# Altium footprint library ProjectFootprints.PcbLib: 37 footprints (part 2 of 3)
Each footprint in its own frame and in the unit in brackets; x right, y up, seen from the top. Pads: shape width x height; smd on the part's side, far side on the other; paste and mask are expansions set on the pad; w line width, h text height; cw(c..) or ccw(c..) is an arc to the next point about the centre after c.
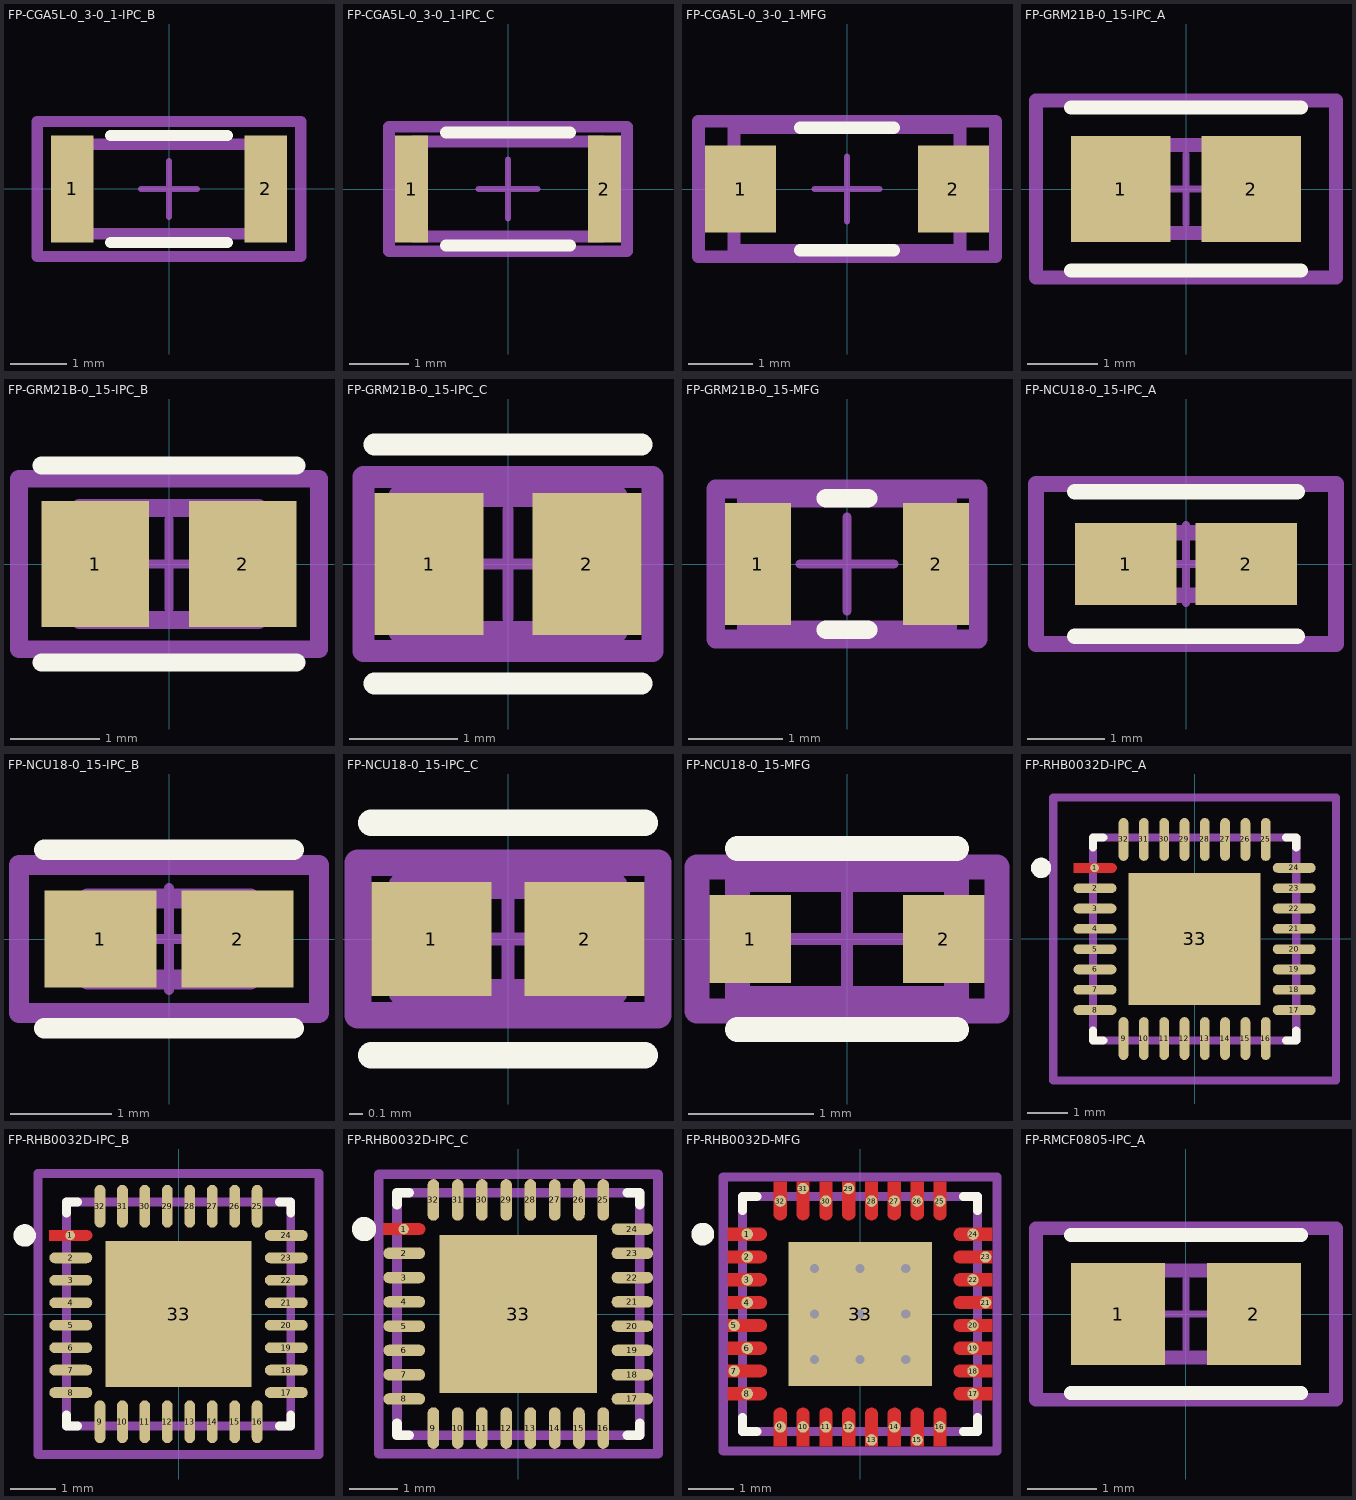
[diagram p1: the footprints below, top view; thin cyan lines are the x and y axes]

## FP-CGA5L-0_3-0_1-IPC_B [mm]
pads (2):
  rect 0.756x1.906 smd paste+0 mask+0: 1(-1.725,0) 2(1.725,0)
Top Overlay:
  lines w0.2: -1.047,-0.953 1.047,-0.953 ; -1.047,0.953 1.047,0.953
Top Assembly:
  lines w0.2: -2.353,-1.203 -2.353,1.203 2.353,1.203 2.353,-1.203 -2.353,-1.203
  text ".Designator" at 0,0.188 h1
Top 3D Body:
  lines w0.2: -1.6,-0.8 -1.6,0.8 1.6,0.8 1.6,-0.8 -1.6,-0.8
Top Courtyard:
  lines w0.2: -2.353,-1.203 -2.353,1.203 2.353,1.203 2.353,-1.203 -2.353,-1.203
Top Component Center:
  lines w0.1: -0.5,0 0.5,0 ; 0,-0.5 0,0.5
3D body "Cap_TDK_CGA5L2X7R2A154K160AA_eec.STEP": height 0.25, standoff 0, extent -2.353,-1.203 2.353,1.203

## FP-CGA5L-0_3-0_1-IPC_C [mm]
pads (2):
  rect 0.556x1.806 smd paste+0 mask+0: 1(-1.625,0) 2(1.625,0)
Top Overlay:
  lines w0.2: -1.047,-0.95 1.047,-0.95 ; -1.047,0.95 1.047,0.95
Top Assembly:
  lines w0.2: -2.003,-1.05 -2.003,1.05 2.003,1.05 2.003,-1.05 -2.003,-1.05
  text ".Designator" at 0,0.188 h1
Top 3D Body:
  lines w0.2: -1.6,-0.8 -1.6,0.8 1.6,0.8 1.6,-0.8 -1.6,-0.8
Top Courtyard:
  lines w0.2: -2.003,-1.05 -2.003,1.05 2.003,1.05 2.003,-1.05 -2.003,-1.05
Top Component Center:
  lines w0.1: -0.5,0 0.5,0 ; 0,-0.5 0,0.5
3D body "Cap_TDK_CGA5L2X7R2A154K160AA_eec.STEP": height 0.25, standoff 0, extent -2.003,-1.05 2.003,1.05

## FP-CGA5L-0_3-0_1-MFG [mm]
pads (2):
  rect 1.1x1.35 smd paste+0 mask+0: 1(-1.65,0) 2(1.65,0)
Top Overlay:
  lines w0.2: -0.725,-0.95 0.725,-0.95 ; -0.725,0.95 0.725,0.95
Top Assembly:
  lines w0.2: -2.3,-1.05 2.3,-1.05 2.3,1.05 -2.3,1.05 -2.3,-1.05
  text ".Designator" at 0,0.188 h1
Top 3D Body:
  lines w0.2: -1.75,-0.95 1.75,-0.95 1.75,0.95 -1.75,0.95 -1.75,-0.95
Top Courtyard:
  lines w0.2: -2.3,-1.05 2.3,-1.05 2.3,1.05 -2.3,1.05 -2.3,-1.05
Top Component Center:
  lines w0.1: -0.5,0 0.5,0 ; 0,-0.5 0,0.5
3D body "Cap_TDK_CGA5L2X7R2A154K160AA_eec.STEP": height 0.25, standoff 0, extent -2.3,-1.05 2.3,1.05

## FP-GRM21B-0_15-IPC_A [mm]
pads (2):
  rect 1.406x1.508 smd paste+0 mask+0: 1(-0.926,0) 2(0.926,0)
Top Overlay:
  lines w0.2: -1.629,-1.154 1.629,-1.154 ; -1.629,1.154 1.629,1.154
Top Assembly:
  lines w0.2: -2.129,-1.254 -2.129,1.254 2.129,1.254 2.129,-1.254 -2.129,-1.254
  text ".Designator" at 0,0.188 h1
Top 3D Body:
  lines w0.2: -1,-0.625 -1,0.625 1,0.625 1,-0.625 -1,-0.625
Top Courtyard:
  lines w0.2: -2.129,-1.254 -2.129,1.254 2.129,1.254 2.129,-1.254 -2.129,-1.254
Top Component Center:
  lines w0.1: -0.5,0 0.5,0 ; 0,-0.5 0,0.5
3D body "Cap_Murata_GRM21BC81C106KA73L_eec.STEP": height 0.25, standoff 0, extent -2.129,-1.254 2.129,1.254

## FP-GRM21B-0_15-IPC_B [mm]
pads (2):
  rect 1.206x1.408 smd paste+0 mask+0: 1(-0.826,0) 2(0.826,0)
Top Overlay:
  lines w0.2: -1.429,-1.104 1.429,-1.104 ; -1.429,1.104 1.429,1.104
Top Assembly:
  lines w0.2: -1.679,-0.954 -1.679,0.954 1.679,0.954 1.679,-0.954 -1.679,-0.954
  text ".Designator" at 0,0.188 h1
Top 3D Body:
  lines w0.2: -1,-0.625 -1,0.625 1,0.625 1,-0.625 -1,-0.625
Top Courtyard:
  lines w0.2: -1.679,-0.954 -1.679,0.954 1.679,0.954 1.679,-0.954 -1.679,-0.954
Top Component Center:
  lines w0.1: -0.5,0 0.5,0 ; 0,-0.5 0,0.5
3D body "Cap_Murata_GRM21BC81C106KA73L_eec.STEP": height 0.25, standoff 0, extent -1.679,-0.954 1.679,0.954

## FP-GRM21B-0_15-IPC_C [mm]
pads (2):
  rect 1.006x1.308 smd paste+0 mask+0: 1(-0.726,0) 2(0.726,0)
Top Overlay:
  lines w0.2: -1.229,-1.1 1.229,-1.1 ; -1.229,1.1 1.229,1.1
Top Assembly:
  lines w0.2: -1.329,-0.8 -1.329,0.8 1.329,0.8 1.329,-0.8 -1.329,-0.8
  text ".Designator" at 0,0.188 h1
Top 3D Body:
  lines w0.2: -1,-0.625 -1,0.625 1,0.625 1,-0.625 -1,-0.625
Top Courtyard:
  lines w0.2: -1.329,-0.8 -1.329,0.8 1.329,0.8 1.329,-0.8 -1.329,-0.8
Top Component Center:
  lines w0.1: -0.5,0 0.5,0 ; 0,-0.5 0,0.5
3D body "Cap_Murata_GRM21BC81C106KA73L_eec.STEP": height 0.25, standoff 0, extent -1.329,-0.8 1.329,0.8

## FP-GRM21B-0_15-MFG [mm]
pads (2):
  rect 0.7x1.3 smd paste+0 mask+0: 1(-0.95,0) 2(0.95,0)
Top Overlay:
  lines w0.2: -0.225,-0.7 0.225,-0.7 ; -0.225,0.7 0.225,0.7
Top Assembly:
  lines w0.2: -1.4,-0.8 1.4,-0.8 1.4,0.8 -1.4,0.8 -1.4,-0.8
  text ".Designator" at 0,0.188 h1
Top 3D Body:
  lines w0.2: -1.075,-0.7 1.075,-0.7 1.075,0.7 -1.075,0.7 -1.075,-0.7
Top Courtyard:
  lines w0.2: -1.4,-0.8 1.4,-0.8 1.4,0.8 -1.4,0.8 -1.4,-0.8
Top Component Center:
  lines w0.1: -0.5,0 0.5,0 ; 0,-0.5 0,0.5
3D body "Cap_Murata_GRM21BC81C106KA73L_eec.STEP": height 0.25, standoff 0, extent -1.4,-0.8 1.4,0.8

## FP-NCU18-0_15-IPC_A [mm]
pads (2):
  rect 1.306x1.058 smd paste+0 mask+0: 1(-0.776,0) 2(0.776,0)
Top Overlay:
  lines w0.2: -1.429,-0.929 1.429,-0.929 ; -1.429,0.929 1.429,0.929
Top Assembly:
  lines w0.2: -1.929,-1.029 -1.929,1.029 1.929,1.029 1.929,-1.029 -1.929,-1.029
  text ".Designator" at 0,0.188 h1
Top 3D Body:
  lines w0.2: -0.8,-0.4 -0.8,0.4 0.8,0.4 0.8,-0.4 -0.8,-0.4
Top Courtyard:
  lines w0.2: -1.929,-1.029 -1.929,1.029 1.929,1.029 1.929,-1.029 -1.929,-1.029
Top Component Center:
  lines w0.1: -0.5,0 0.5,0 ; 0,-0.5 0,0.5
3D body "Res_Murata_NCU18WB473J6SRB_eec.STEP": height 0.25, standoff 0, extent -1.929,-1.029 1.929,1.029

## FP-NCU18-0_15-IPC_B [mm]
pads (2):
  rect 1.106x0.958 smd paste+0 mask+0: 1(-0.676,0) 2(0.676,0)
Top Overlay:
  lines w0.2: -1.229,-0.879 1.229,-0.879 ; -1.229,0.879 1.229,0.879
Top Assembly:
  lines w0.2: -1.479,-0.729 1.479,-0.729 1.479,0.729 -1.479,0.729 -1.479,-0.729
  text ".Designator" at 0,0.188 h1
Top 3D Body:
  lines w0.2: -0.8,-0.4 0.8,-0.4 0.8,0.4 -0.8,0.4 -0.8,-0.4
Top Courtyard:
  lines w0.2: -1.479,-0.729 1.479,-0.729 1.479,0.729 -1.479,0.729 -1.479,-0.729
Top Component Center:
  lines w0.1: -0.5,0 0.5,0 ; 0,-0.5 0,0.5
3D body "Res_Murata_NCU18WB473J6SRB_eec.STEP": height 0.25, standoff 0, extent -1.479,-0.729 1.479,0.729

## FP-NCU18-0_15-IPC_C [mm]
pads (2):
  rect 0.906x0.858 smd paste+0 mask+0: 1(-0.576,0) 2(0.576,0)
Top Overlay:
  lines w0.2: -1.029,-0.875 1.029,-0.875 ; -1.029,0.875 1.029,0.875
Top Assembly:
  lines w0.2: -1.129,-0.575 1.129,-0.575 1.129,0.575 -1.129,0.575 -1.129,-0.575
  text ".Designator" at 0,0.188 h1
Top 3D Body:
  lines w0.2: -0.8,-0.4 0.8,-0.4 0.8,0.4 -0.8,0.4 -0.8,-0.4
Top Courtyard:
  lines w0.2: -1.129,-0.575 1.129,-0.575 1.129,0.575 -1.129,0.575 -1.129,-0.575
Top Component Center:
  lines w0.1: -0.5,0 0.5,0 ; 0,-0.5 0,0.5
3D body "Res_Murata_NCU18WB473J6SRB_eec.STEP": height 0.25, standoff 0, extent -1.129,-0.575 1.129,0.575

## FP-NCU18-0_15-MFG [mm]
pads (2):
  rect 0.65x0.7 smd paste+0 mask+0: 1(-0.775,0) 2(0.775,0)
Top Overlay:
  lines w0.2: -0.875,-0.725 0.875,-0.725 ; -0.875,0.725 0.875,0.725
Top Assembly:
  lines w0.2: -1.2,-0.575 1.2,-0.575 1.2,0.575 -1.2,0.575 -1.2,-0.575
  text ".Designator" at 0,0.188 h1
Top 3D Body:
  lines w0.2: -0.875,-0.475 0.875,-0.475 0.875,0.475 -0.875,0.475 -0.875,-0.475
Top Courtyard:
  lines w0.2: -1.2,-0.575 1.2,-0.575 1.2,0.575 -1.2,0.575 -1.2,-0.575
Top Component Center:
  lines w0.1: -0.5,0 0.5,0 ; 0,-0.5 0,0.5
3D body "Res_Murata_NCU18WB473J6SRB_eec.STEP": height 0.25, standoff 0, extent -1.2,-0.575 1.2,0.575

## FP-RHB0032D-IPC_A [mm]
pads (33):
  round 0.215 smd paste+0 mask+0: 1(-2.463,1.75)
  rrect100% 1.057x0.239 smd paste+0 mask+0: 2(-2.451,1.25) 3(-2.451,0.75) 4(-2.451,0.25) 5(-2.451,-0.25) 6(-2.451,-0.75) 7(-2.451,-1.25) 8(-2.451,-1.75) 17(2.451,-1.75) 18(2.451,-1.25) 19(2.451,-0.75) 20(2.451,-0.25) 21(2.451,0.25) 22(2.451,0.75) 23(2.451,1.25) 24(2.451,1.75)
  rrect100% 0.239x1.057 smd paste+0 mask+0: 9(-1.75,-2.451) 10(-1.25,-2.451) 11(-0.75,-2.451) 12(-0.25,-2.451) 13(0.25,-2.451) 14(0.75,-2.451) 15(1.25,-2.451) 16(1.75,-2.451) 25(1.75,2.451) 26(1.25,2.451) 27(0.75,2.451) 28(0.25,2.451) 29(-0.25,2.451) 30(-0.75,2.451) 31(-1.25,2.451) 32(-1.75,2.451)
  rect 3.25x3.25 smd paste-1000 mask+0: 33(0,0)
Top Layer:
  region: -2.979,1.87 -2.042,1.87 -2.018,1.87 -1.974,1.851 -1.94,1.818 -1.922,1.774 -1.922,1.75 -1.922,1.726 -1.94,1.682 -1.974,1.649 -2.018,1.63 -2.042,1.63 -2.979,1.63
Top Overlay:
  circle w0.25: c-3.779,1.75 r0.125
  lines w0.2: -2.5,-2.25 -2.5,-2.5 -2.25,-2.5 ; -2.5,2.25 -2.5,2.5 -2.25,2.5 ; 2.25,-2.5 2.5,-2.5 2.5,-2.25 ; 2.25,2.5 2.5,2.5 2.5,2.25
Top Paste:
  rectangle: -1.028,-1.028 1.028,1.028
Top Assembly:
  lines w0.2: -3.479,-3.479 -3.479,3.479 3.479,3.479 3.479,-3.479 -3.479,-3.479
  text ".Designator" at 0,0.188 h1
Top 3D Body:
  lines w0.2: -2.5,-2.5 -2.5,2.5 2.5,2.5 2.5,-2.5 -2.5,-2.5
Top Courtyard:
  lines w0.2: -3.479,-3.479 -3.479,3.479 3.479,3.479 3.479,-3.479 -3.479,-3.479
Top Component Center:
  lines w0.1: -0.5,0 0.5,0 ; 0,-0.5 0,0.5
3D body "IC_Texas_Instruments_ADS1204IRHBR_eec.STEP": height 0.25, standoff 0, extent -3.479,-3.479 3.479,3.479

## FP-RHB0032D-IPC_B [mm]
pads (33):
  round 0.215 smd paste+0 mask+0: 1(-2.413,1.75)
  rrect100% 0.957x0.239 smd paste+0 mask+0: 2(-2.401,1.25) 3(-2.401,0.75) 4(-2.401,0.25) 5(-2.401,-0.25) 6(-2.401,-0.75) 7(-2.401,-1.25) 8(-2.401,-1.75) 17(2.401,-1.75) 18(2.401,-1.25) 19(2.401,-0.75) 20(2.401,-0.25) 21(2.401,0.25) 22(2.401,0.75) 23(2.401,1.25) 24(2.401,1.75)
  rrect100% 0.239x0.957 smd paste+0 mask+0: 9(-1.75,-2.401) 10(-1.25,-2.401) 11(-0.75,-2.401) 12(-0.25,-2.401) 13(0.25,-2.401) 14(0.75,-2.401) 15(1.25,-2.401) 16(1.75,-2.401) 25(1.75,2.401) 26(1.25,2.401) 27(0.75,2.401) 28(0.25,2.401) 29(-0.25,2.401) 30(-0.75,2.401) 31(-1.25,2.401) 32(-1.75,2.401)
  rect 3.25x3.25 smd paste-1000 mask+0: 33(0,0)
Top Layer:
  region: -2.879,1.87 -2.042,1.87 -2.018,1.87 -1.974,1.851 -1.94,1.818 -1.922,1.774 -1.922,1.75 -1.922,1.726 -1.94,1.682 -1.974,1.649 -2.018,1.63 -2.042,1.63 -2.879,1.63
Top Overlay:
  circle w0.25: c-3.429,1.75 r0.125
  lines w0.2: -2.5,-2.25 -2.5,-2.5 -2.25,-2.5 ; -2.5,2.25 -2.5,2.5 -2.25,2.5 ; 2.25,-2.5 2.5,-2.5 2.5,-2.25 ; 2.25,2.5 2.5,2.5 2.5,2.25
Top Paste:
  rectangle: -1.028,-1.028 1.028,1.028
Top Assembly:
  lines w0.2: -3.129,-3.129 3.129,-3.129 3.129,3.129 -3.129,3.129 -3.129,-3.129
  text ".Designator" at 0,0.188 h1
Top 3D Body:
  lines w0.2: -2.5,-2.5 2.5,-2.5 2.5,2.5 -2.5,2.5 -2.5,-2.5
Top Courtyard:
  lines w0.2: -3.129,-3.129 3.129,-3.129 3.129,3.129 -3.129,3.129 -3.129,-3.129
Top Component Center:
  lines w0.1: -0.5,0 0.5,0 ; 0,-0.5 0,0.5
3D body "IC_Texas_Instruments_ADS1204IRHBR_eec.STEP": height 0.25, standoff 0, extent -3.129,-3.129 3.129,3.129

## FP-RHB0032D-IPC_C [mm]
pads (33):
  round 0.215 smd paste+0 mask+0: 1(-2.363,1.75)
  rrect100% 0.857x0.239 smd paste+0 mask+0: 2(-2.351,1.25) 3(-2.351,0.75) 4(-2.351,0.25) 5(-2.351,-0.25) 6(-2.351,-0.75) 7(-2.351,-1.25) 8(-2.351,-1.75) 17(2.351,-1.75) 18(2.351,-1.25) 19(2.351,-0.75) 20(2.351,-0.25) 21(2.351,0.25) 22(2.351,0.75) 23(2.351,1.25) 24(2.351,1.75)
  rrect100% 0.239x0.857 smd paste+0 mask+0: 9(-1.75,-2.351) 10(-1.25,-2.351) 11(-0.75,-2.351) 12(-0.25,-2.351) 13(0.25,-2.351) 14(0.75,-2.351) 15(1.25,-2.351) 16(1.75,-2.351) 25(1.75,2.351) 26(1.25,2.351) 27(0.75,2.351) 28(0.25,2.351) 29(-0.25,2.351) 30(-0.75,2.351) 31(-1.25,2.351) 32(-1.75,2.351)
  rect 3.25x3.25 smd paste-1000 mask+0: 33(0,0)
Top Layer:
  region: -2.779,1.87 -2.042,1.87 -2.018,1.87 -1.974,1.851 -1.94,1.818 -1.922,1.774 -1.922,1.75 -1.922,1.726 -1.94,1.682 -1.974,1.649 -2.018,1.63 -2.042,1.63 -2.779,1.63
Top Overlay:
  circle w0.25: c-3.179,1.75 r0.125
  lines w0.2: -2.5,-2.25 -2.5,-2.5 -2.25,-2.5 ; -2.5,2.25 -2.5,2.5 -2.25,2.5 ; 2.25,-2.5 2.5,-2.5 2.5,-2.25 ; 2.25,2.5 2.5,2.5 2.5,2.25
Top Paste:
  rectangle: -1.028,-1.028 1.028,1.028
Top Assembly:
  lines w0.2: -2.879,-2.879 2.879,-2.879 2.879,2.879 -2.879,2.879 -2.879,-2.879
  text ".Designator" at 0,0.188 h1
Top 3D Body:
  lines w0.2: -2.5,-2.5 2.5,-2.5 2.5,2.5 -2.5,2.5 -2.5,-2.5
Top Courtyard:
  lines w0.2: -2.879,-2.879 2.879,-2.879 2.879,2.879 -2.879,2.879 -2.879,-2.879
Top Component Center:
  lines w0.1: -0.5,0 0.5,0 ; 0,-0.5 0,0.5
3D body "IC_Texas_Instruments_ADS1204IRHBR_eec.STEP": height 0.25, standoff 0, extent -2.879,-2.879 2.879,2.879

## FP-RHB0032D-MFG [mm]
pads (33):
  round 0.252 smd paste-1000 mask+0: 1(-2.475,1.75) 2(-2.475,1.25) 3(-2.475,0.75) 4(-2.475,0.25) 5(-2.76,-0.25) 6(-2.475,-0.75) 7(-2.76,-1.25) 8(-2.475,-1.75) 9(-1.75,-2.475) 10(-1.25,-2.475) 11(-0.75,-2.475) 12(-0.25,-2.475) 13(0.25,-2.76) 14(0.75,-2.475) 15(1.25,-2.76) 16(1.75,-2.475) 17(2.475,-1.75) 18(2.475,-1.25) 19(2.475,-0.75) 20(2.475,-0.25) 21(2.75,0.25) 22(2.475,0.75) 23(2.75,1.25) 24(2.475,1.75) 25(1.75,2.475) 26(1.25,2.475) 27(0.75,2.475) 28(0.25,2.475) 29(-0.25,2.75) 30(-0.75,2.475) 31(-1.25,2.75) 32(-1.75,2.475)
  rect 3.15x3.15 smd paste-1000 mask+0: 33(0,0)
via -1,1 diameter 0.5 hole 0.2
via 0,1 diameter 0.5 hole 0.2
via 1,1 diameter 0.5 hole 0.2
via -1,-1 diameter 0.5 hole 0.2
via 0,-1 diameter 0.5 hole 0.2
via 1,-1 diameter 0.5 hole 0.2
via -1,0 diameter 0.5 hole 0.2
via 0,0 diameter 0.5 hole 0.2
via 1,0 diameter 0.5 hole 0.2
Top Layer:
  region: -2.9,1.89 -2.19,1.89 -2.162,1.89 -2.111,1.869 -2.071,1.829 -2.05,1.778 -2.05,1.75 -2.05,1.722 -2.071,1.671 -2.111,1.631 -2.162,1.61 -2.19,1.61 -2.9,1.61
  region: -2.9,1.39 -2.19,1.39 -2.162,1.39 -2.111,1.369 -2.071,1.329 -2.05,1.278 -2.05,1.25 -2.05,1.222 -2.071,1.171 -2.111,1.131 -2.162,1.11 -2.19,1.11 -2.9,1.11
  region: -2.9,0.89 -2.19,0.89 -2.162,0.89 -2.111,0.869 -2.071,0.829 -2.05,0.778 -2.05,0.75 -2.05,0.722 -2.071,0.671 -2.111,0.631 -2.162,0.61 -2.19,0.61 -2.9,0.61
  region: -2.9,0.39 -2.19,0.39 -2.162,0.39 -2.111,0.369 -2.071,0.329 -2.05,0.278 -2.05,0.25 -2.05,0.222 -2.071,0.171 -2.111,0.131 -2.162,0.11 -2.19,0.11 -2.9,0.11
  region: -2.9,-0.11 -2.19,-0.11 -2.162,-0.11 -2.111,-0.131 -2.071,-0.171 -2.05,-0.222 -2.05,-0.25 -2.05,-0.278 -2.071,-0.329 -2.111,-0.369 -2.162,-0.39 -2.19,-0.39 -2.9,-0.39
  region: -2.9,-0.61 -2.19,-0.61 -2.162,-0.61 -2.111,-0.631 -2.071,-0.671 -2.05,-0.722 -2.05,-0.75 -2.05,-0.778 -2.071,-0.829 -2.111,-0.869 -2.162,-0.89 -2.19,-0.89 -2.9,-0.89
  region: -2.9,-1.11 -2.19,-1.11 -2.162,-1.11 -2.111,-1.131 -2.071,-1.171 -2.05,-1.222 -2.05,-1.25 -2.05,-1.278 -2.071,-1.329 -2.111,-1.369 -2.162,-1.39 -2.19,-1.39 -2.9,-1.39
  region: -2.9,-1.61 -2.19,-1.61 -2.162,-1.61 -2.111,-1.631 -2.071,-1.671 -2.05,-1.722 -2.05,-1.75 -2.05,-1.778 -2.071,-1.829 -2.111,-1.869 -2.162,-1.89 -2.19,-1.89 -2.9,-1.89
  region: 2.9,-1.89 2.19,-1.89 2.162,-1.89 2.111,-1.869 2.071,-1.829 2.05,-1.778 2.05,-1.75 2.05,-1.722 2.071,-1.671 2.111,-1.631 2.162,-1.61 2.19,-1.61 2.9,-1.61
  region: 2.9,-1.39 2.19,-1.39 2.162,-1.39 2.111,-1.369 2.071,-1.329 2.05,-1.278 2.05,-1.25 2.05,-1.222 2.071,-1.171 2.111,-1.131 2.162,-1.11 2.19,-1.11 2.9,-1.11
  region: 2.9,-0.89 2.19,-0.89 2.162,-0.89 2.111,-0.869 2.071,-0.829 2.05,-0.778 2.05,-0.75 2.05,-0.722 2.071,-0.671 2.111,-0.631 2.162,-0.61 2.19,-0.61 2.9,-0.61
  region: 2.9,-0.39 2.19,-0.39 2.162,-0.39 2.111,-0.369 2.071,-0.329 2.05,-0.278 2.05,-0.25 2.05,-0.222 2.071,-0.171 2.111,-0.131 2.162,-0.11 2.19,-0.11 2.9,-0.11
  region: 2.9,0.11 2.19,0.11 2.162,0.11 2.111,0.131 2.071,0.171 2.05,0.222 2.05,0.25 2.05,0.278 2.071,0.329 2.111,0.369 2.162,0.39 2.19,0.39 2.9,0.39
  region: 2.9,0.61 2.19,0.61 2.162,0.61 2.111,0.631 2.071,0.671 2.05,0.722 2.05,0.75 2.05,0.778 2.071,0.829 2.111,0.869 2.162,0.89 2.19,0.89 2.9,0.89
  region: 2.9,1.11 2.19,1.11 2.162,1.11 2.111,1.131 2.071,1.171 2.05,1.222 2.05,1.25 2.05,1.278 2.071,1.329 2.111,1.369 2.162,1.39 2.19,1.39 2.9,1.39
  region: 2.9,1.61 2.19,1.61 2.162,1.61 2.111,1.631 2.071,1.671 2.05,1.722 2.05,1.75 2.05,1.778 2.071,1.829 2.111,1.869 2.162,1.89 2.19,1.89 2.9,1.89
  region: -1.89,-2.9 -1.89,-2.19 -1.89,-2.162 -1.869,-2.111 -1.829,-2.071 -1.778,-2.05 -1.75,-2.05 -1.722,-2.05 -1.671,-2.071 -1.631,-2.111 -1.61,-2.162 -1.61,-2.19 -1.61,-2.9
  region: -1.39,-2.9 -1.39,-2.19 -1.39,-2.162 -1.369,-2.111 -1.329,-2.071 -1.278,-2.05 -1.25,-2.05 -1.222,-2.05 -1.171,-2.071 -1.131,-2.111 -1.11,-2.162 -1.11,-2.19 -1.11,-2.9
  region: -0.89,-2.9 -0.89,-2.19 -0.89,-2.162 -0.869,-2.111 -0.829,-2.071 -0.778,-2.05 -0.75,-2.05 -0.722,-2.05 -0.671,-2.071 -0.631,-2.111 -0.61,-2.162 -0.61,-2.19 -0.61,-2.9
  region: -0.39,-2.9 -0.39,-2.19 -0.39,-2.162 -0.369,-2.111 -0.329,-2.071 -0.278,-2.05 -0.25,-2.05 -0.222,-2.05 -0.171,-2.071 -0.131,-2.111 -0.11,-2.162 -0.11,-2.19 -0.11,-2.9
  region: 0.11,-2.9 0.11,-2.19 0.11,-2.162 0.131,-2.111 0.171,-2.071 0.222,-2.05 0.25,-2.05 0.278,-2.05 0.329,-2.071 0.369,-2.111 0.39,-2.162 0.39,-2.19 0.39,-2.9
  region: 0.61,-2.9 0.61,-2.19 0.61,-2.162 0.631,-2.111 0.671,-2.071 0.722,-2.05 0.75,-2.05 0.778,-2.05 0.829,-2.071 0.869,-2.111 0.89,-2.162 0.89,-2.19 0.89,-2.9
  region: 1.11,-2.9 1.11,-2.19 1.11,-2.162 1.131,-2.111 1.171,-2.071 1.222,-2.05 1.25,-2.05 1.278,-2.05 1.329,-2.071 1.369,-2.111 1.39,-2.162 1.39,-2.19 1.39,-2.9
  region: 1.61,-2.9 1.61,-2.19 1.61,-2.162 1.631,-2.111 1.671,-2.071 1.722,-2.05 1.75,-2.05 1.778,-2.05 1.829,-2.071 1.869,-2.111 1.89,-2.162 1.89,-2.19 1.89,-2.9
  region: 1.89,2.9 1.89,2.19 1.89,2.162 1.869,2.111 1.829,2.071 1.778,2.05 1.75,2.05 1.722,2.05 1.671,2.071 1.631,2.111 1.61,2.162 1.61,2.19 1.61,2.9
  region: 1.39,2.9 1.39,2.19 1.39,2.162 1.369,2.111 1.329,2.071 1.278,2.05 1.25,2.05 1.222,2.05 1.171,2.071 1.131,2.111 1.11,2.162 1.11,2.19 1.11,2.9
  region: 0.89,2.9 0.89,2.19 0.89,2.162 0.869,2.111 0.829,2.071 0.778,2.05 0.75,2.05 0.722,2.05 0.671,2.071 0.631,2.111 0.61,2.162 0.61,2.19 0.61,2.9
  region: 0.39,2.9 0.39,2.19 0.39,2.162 0.369,2.111 0.329,2.071 0.278,2.05 0.25,2.05 0.222,2.05 0.171,2.071 0.131,2.111 0.11,2.162 0.11,2.19 0.11,2.9
  region: -0.11,2.9 -0.11,2.19 -0.11,2.162 -0.131,2.111 -0.171,2.071 -0.222,2.05 -0.25,2.05 -0.278,2.05 -0.329,2.071 -0.369,2.111 -0.39,2.162 -0.39,2.19 -0.39,2.9
  region: -0.61,2.9 -0.61,2.19 -0.61,2.162 -0.631,2.111 -0.671,2.071 -0.722,2.05 -0.75,2.05 -0.778,2.05 -0.829,2.071 -0.869,2.111 -0.89,2.162 -0.89,2.19 -0.89,2.9
  region: -1.11,2.9 -1.11,2.19 -1.11,2.162 -1.131,2.111 -1.171,2.071 -1.222,2.05 -1.25,2.05 -1.278,2.05 -1.329,2.071 -1.369,2.111 -1.39,2.162 -1.39,2.19 -1.39,2.9
  region: -1.61,2.9 -1.61,2.19 -1.61,2.162 -1.631,2.111 -1.671,2.071 -1.722,2.05 -1.75,2.05 -1.778,2.05 -1.829,2.071 -1.869,2.111 -1.89,2.162 -1.89,2.19 -1.89,2.9
Top Overlay:
  circle w0.25: c-3.45,1.75 r0.125
  lines w0.2: -2.575,-2.265 -2.575,-2.575 -2.265,-2.575 ; -2.575,2.265 -2.575,2.575 -2.265,2.575 ; 2.265,-2.575 2.575,-2.575 2.575,-2.265 ; 2.265,2.575 2.575,2.575 2.575,2.265
Top Paste:
  drawing of 36 lines, arcs and shapes, not listed
Top Assembly:
  lines w0.2: -3,-3 3,-3 3,3 -3,3 -3,-3
  text ".Designator" at 0,-0.001 h1
Top 3D Body:
  lines w0.2: -2.575,-2.575 2.575,-2.575 2.575,2.575 -2.575,2.575 -2.575,-2.575
Top Courtyard:
  lines w0.2: -3,-3 3,-3 3,3 -3,3 -3,-3
Top Component Center:
  lines w0.1: -0.5,0 0.5,0 ; 0,-0.5 0,0.5
3D body "IC_Texas_Instruments_ADS1204IRHBR_eec.STEP": height 0.25, standoff 0, extent -3,-3 3,3

## FP-RMCF0805-IPC_A [mm]
pads (2):
  rect 1.355x1.462 smd paste+0 mask+0: 1(-0.976,0) 2(0.976,0)
Top Overlay:
  lines w0.2: -1.653,-1.131 1.653,-1.131 ; -1.653,1.131 1.653,1.131
Top Assembly:
  lines w0.2: -2.153,-1.231 -2.153,1.231 2.153,1.231 2.153,-1.231 -2.153,-1.231
  text ".Designator" at 0,0.188 h1
Top 3D Body:
  lines w0.2: -1,-0.625 -1,0.625 1,0.625 1,-0.625 -1,-0.625
Top Courtyard:
  lines w0.2: -2.153,-1.231 -2.153,1.231 2.153,1.231 2.153,-1.231 -2.153,-1.231
Top Component Center:
  lines w0.1: -0.5,0 0.5,0 ; 0,-0.5 0,0.5
3D body "Res_Stackpole_Electronics_RMCF0805JT220K_eec.STEP": height 0.25, standoff 0, extent -2.153,-1.231 2.153,1.231